# Altium integrated library DMP2160UW-7.IntLib: 1 symbol
Pins are listed as number, name and electrical type; pins without a type are passive.

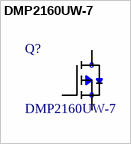
[diagram p0: symbol DMP2160UW-7]

## DMP2160UW-7
designator Q?
DMP2160UW Series 20 V 100 mOhm P-Channel Enhancement Mode Mosfet - SOT-323; MF: Diodes Inc.; MP: DMP2160UW-7; Digi-Key_Purchase_URL: https://www.digikey.com.tr/product-detail/en/diodes-incorporated/DMP2160UW-7/DMP2160UWDICT-ND/2052808?utm_source=snapeda&utm_medium=aggregator&utm_campaign=symbol; Package: SOT-323 Diodes Inc.; SnapEDA_Link: https://www.snapeda.com/parts/DMP2160UW-7/Diodes%20Inc./view-part/?ref=snap; Digi-Key_Part_Number: DMP2160UWDICT-ND; Value: *
footprint *SOT65P210X110-3N
pins: 1 G, 2 S, 3 D